# Altium schematic symbol library IndoorGuide_Tag_Device_V1.0.0.SCHLIB: 49 symbols
Pins are listed as number, name and electrical type; pins without a type are passive.

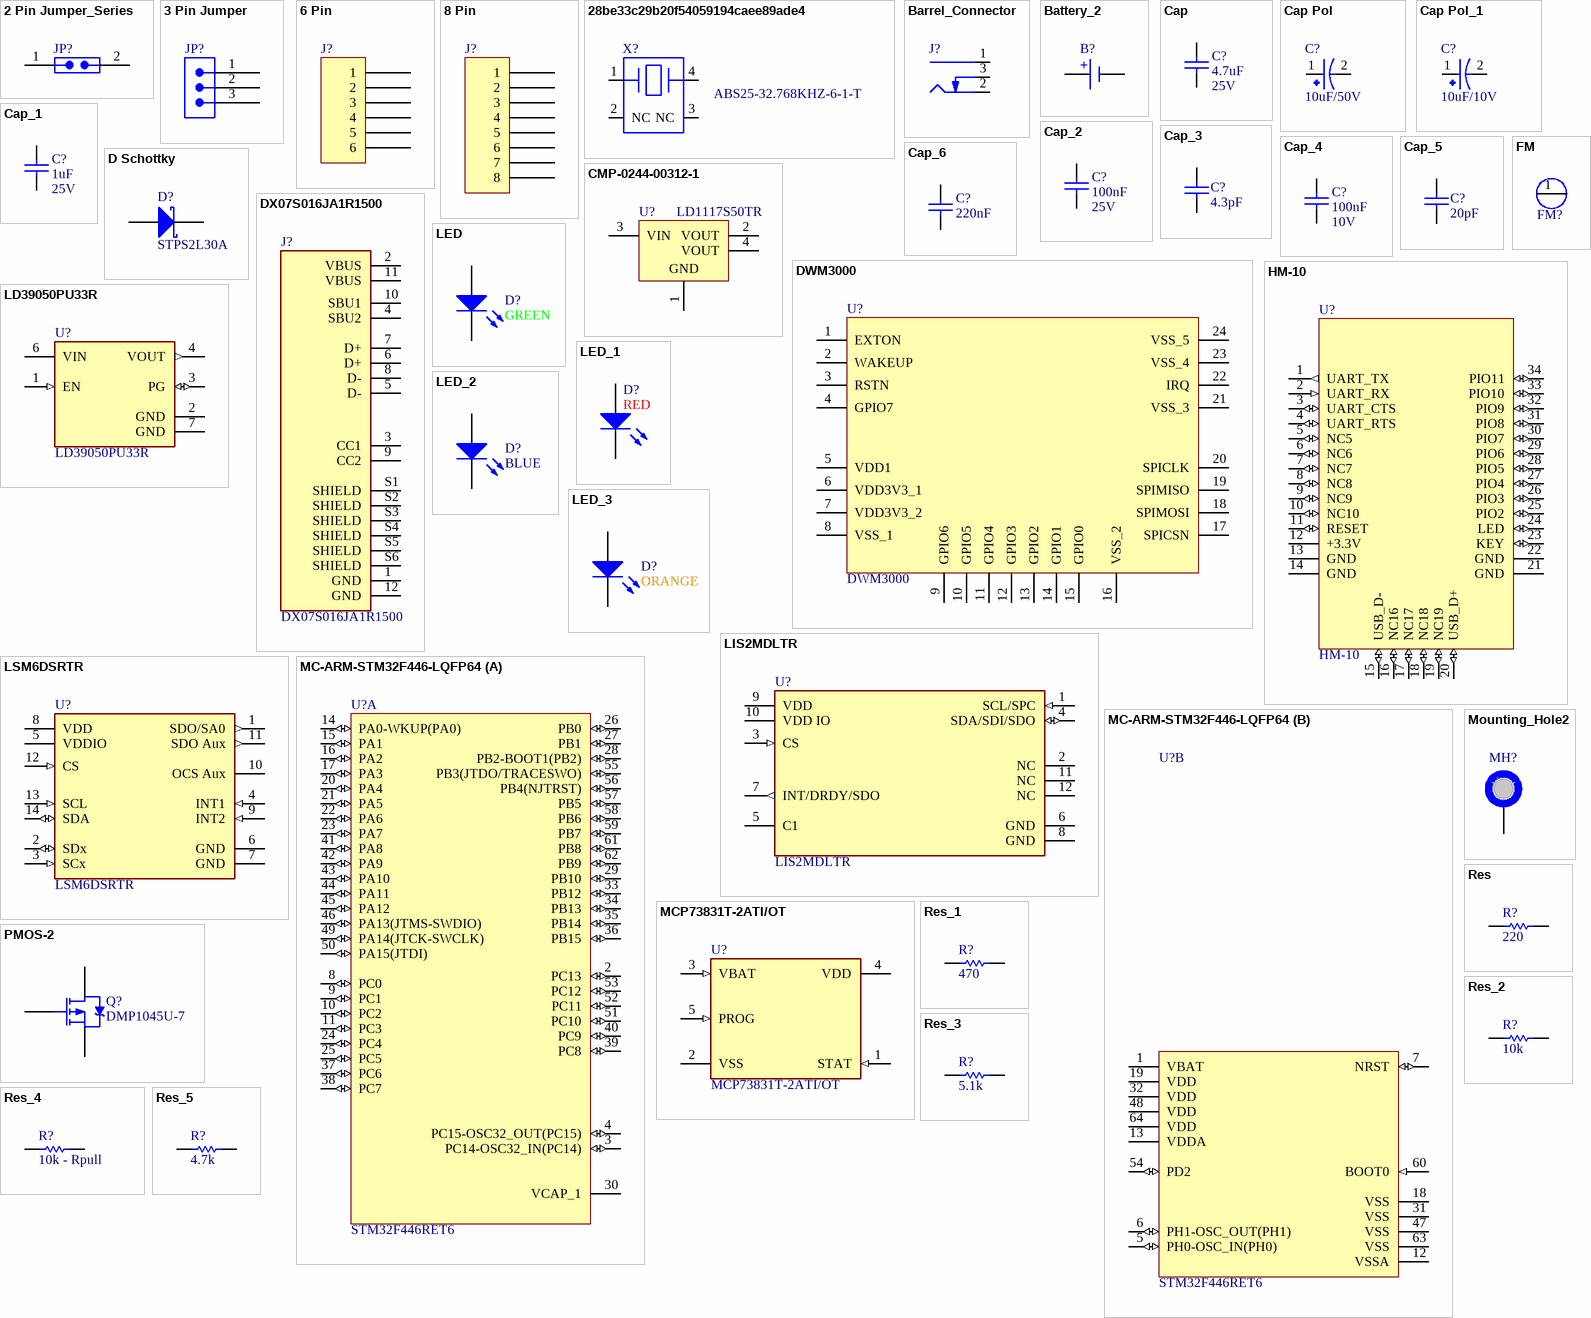
[diagram p0: symbols 2 Pin Jumper_Series to Res_5]

## 2 Pin Jumper_Series
designator JP?  (value not drawn)
2 Pin Jumper - place in series with wires.; Part Number: NC6-P108-03; Manufacturer: TE Connectivity AMP Connectors; Voltage Rating: 300V; Barrier Type: 2 Wall (Dual); Bottom Termination: PC Pin; Current Rating (Amps): 20A; Number of Circuits: 3; Pitch: 0.375" (9.53mm); Top Termination: Screws with Captive Plate; Wire Gauge: 12-22 AWG; Color: Black; ComponentLink1Description: Datasheet; ComponentLink1URL: https://www.te.com/commerce/DocumentDelivery/DDEController?Action=srchrtrv&DocNm=3-1437664-0&DocType=Customer+Drawing&DocLang=English; ComponentLink2Description: DigiKey Link; ComponentLink2URL: http://digikey.com/product-detail/en/te-connectivity-amp-connectors/NC6-P108-03/A98496-ND/1277927; LastUpdated: 1/15/2020 4:12:05 AM; Lifecycle Status: Active; Minimum Order: 1; Number of Rows: 1; Number of Wire Entries: 3; Packaging: Bulk; Part Status: Active; Price: 2.16; Series: NC6, Buchanan; Supplier 1: DigiKey; Supplier Part Number 1: A98496-ND; Terminal Block Type: Barrier Block
footprint SAMTEC_HTSW-101-07-S-D
pins: 1, 2

## 3 Pin Jumper
designator JP?
3 Pin Jumper; Voltage Rating: 300V
footprint SAMTEC_TS-103-T-A-1
pins: 1, 2, 3

## 6 Pin
designator J?
CONN RCPT 6POS 0.1 GOLD PCB
footprint HEADER_FEMALE_6POS_P2.54MM (2.54mm DIL PC TAIL PIN HEADER ASSEMBLY)
footprint JST XH B6B-XH-A
footprint TERMINAL_BLOCK_6POS_P2.54MM
footprint TERMINAL_BLOCK_6POS_P5.08MM (Wire to Board Terminal Block Horizontal with Board, 6 Postions, Body 31.08x8.2mm, Pitch 5.08mm)
pins: 1, 2, 3, 4, 5, 6

## 8 Pin
designator J?
CONN RCPT 8POS 0.1 GOLD PCB
footprint HEADER_FEMALE_8POS_P2.54MM (2.54mm DIL PC TAIL PIN HEADER ASSEMBLY)
footprint JST XH B8B-XH-A
footprint TERMINAL_BLOCK_8POS_P2.54MM
footprint TERMINAL_BLOCK_8POS_P5.08MM (Wire to Board Terminal Block Horizontal with Board, 8 Postions, Body 41.24x8.2mm, Pitch 5.08mm)
pins: 1, 2, 3, 4, 5, 6, 7, 8

## 28be33c29b20f54059194caee89ade4
designator X?, comment ABS25-32.768KHZ-6-1-T
SMD,3.8x8.4mm Crystals ROHS; Manufacturer: Abracon; MF: Abracon LLC; JLCPCB: C5369037; MP: ABS25-32.768KHZ-6-1-T; Manufacturer Part Number: ABS25-32.768KHZ-6-1-T
footprint FP-ABS25-MFG
pins: 1, 2 NC, 3 NC, 4

## Barrel_Connector
designator J?
CONN PWR JACK 2X5.5MM SOLDER
footprint PJ-102AH (DC Barrel Jack W/ Switch 2.0x5.5)
pins: 1 Centre, 2 Outer, 3 SW

## Battery_2
designator B?
BATTERY HOLDER 18650 PC PIN
footprint JST XH B2B-XH-A
pins: 1 +, 2 -

## Cap
designator C?, comment 4.7uF  Voltage Rating: 25V
25V 4.7uF X5R ±10% 0805 Multilayer Ceramic Capacitors MLCC - SMD/SMT ROHS; MF: Samsung Electro-Mechanics; MP: CL21A475KAQNNNE; JLCPCB: C1779
footprint cap0603
footprint cap0805
footprint CAP1206
footprint CAP0402
pins: 1, 2

## Cap Pol
designator C?, comment 10uF/50V
10uF 50V 800mΩ@100kHz ±10% CASE-D-7343 Tantalum Capacitors ROHS; MF: TAJD106K050RNJ; JLCPCB: C89596
footprint CAP1411
footprint FP-TAJD-MFG
pins: 1, 2
1 alternate drawing of the same symbol

## Cap Pol_1
designator C?, comment 10uF/10V
10V 10uF X7R ±10% 0805 Multilayer Ceramic Capacitors MLCC - SMD/SMT ROHS; MF: Murata Electronics; MP: GRM21BR71A106KE51L; JLCPCB: C86038
footprint CAP1411
pins: 1, 2
1 alternate drawing of the same symbol

## Cap_1
designator C?, comment 1uF  Voltage Rating: 25V
25V 1uF X7R ±10% 0805 Multilayer Ceramic Capacitors MLCC - SMD/SMT ROHS; MF: Murata Electronics; MP: GRM21BR71E105KA99L; JLCPCB: C77080
footprint cap0603
footprint cap0805
footprint CAP1206
footprint CAP0402
pins: 1, 2

## Cap_2
designator C?, comment 100nF  Voltage Rating: 25V
25V 100nF X7R ±10% 0805 Multilayer Ceramic Capacitors MLCC - SMD/SMT ROHS; MF: YAGEO; MP: CC0805KRX7R8BB104; JLCPCB: C519981
footprint cap0603
footprint cap0805
footprint CAP1206
footprint CAP0402
pins: 1, 2

## Cap_3
designator C?, comment 4.3pF
50V 4.3pF NP0 0805 Multilayer Ceramic Capacitors MLCC - SMD/SMT ROHS; MF: YAGEO; MP: CC0805CRNPO9BN4R3; JLCPCB: C2201928
footprint cap0603
footprint cap0805
footprint CAP1206
footprint CAP0402
pins: 1, 2

## Cap_4
designator C?, comment 100nF  Voltage Rating: 10V
10V 100nF U2J ±5% 0805 Multilayer Ceramic Capacitors MLCC - SMD/SMT ROHS; MF: Murata Electronics; MP: GRM21B7U1A104JA01L; JLCPCB: C710980
footprint cap0603
footprint cap0805
footprint CAP1206
footprint CAP0402
pins: 1, 2

## Cap_5
designator C?, comment 20pF
50V 20pF C0G ±5% 0805 Multilayer Ceramic Capacitors MLCC - SMD/SMT ROHS; MF: Samsung Electro-Mechanics; MP: CL21C200JBANNNC; JLCPCB: C1798
footprint cap0603
footprint cap0805
footprint CAP1206
footprint CAP0402
pins: 1, 2

## Cap_6
designator C?, comment 220nF
25V 220nF X7R ±10% 0805 Multilayer Ceramic Capacitors MLCC - SMD/SMT ROHS; Voltage Rating: 16V; MF: YAGEO; MP: CC0805KRX7R8BB224; JLCPCB: C107139
footprint cap0603
footprint cap0805
footprint CAP1206
footprint CAP0402
pins: 1, 2

## CMP-0244-00312-1
designator U?, comment LD1117S50TR
75dB@(120Hz) 800mA Fixed 5V Positive electrode 15V SOT-223-3 Voltage Regulators - Linear, Low Drop Out (LDO) Regulators ROHS; MF: STMicroelectronics; JLCPCB: C134077; MP: LD1117S50TR; Manufacturer: STMicroelectronics; Manufacturer Part Number: LD1117S50TR
footprint SOT-223_L (SOT223, 4-Leads, Body 6.5x3.5mm, Pitch 2.3mm, Lead Span 7mm, IPC High Density)
footprint SOT-223_N (SOT223, 4-Leads, Body 6.5x3.5mm, Pitch 2.3mm, Lead Span 7mm, IPC Medium Density)
footprint SOT-223_M (SOT223, 4-Leads, Body 6.5x3.5mm, Pitch 2.3mm, Lead Span 7mm, IPC Low Density)
pins: 1 GND (power), 2 VOUT (power), 3 VIN (power), 4 VOUT (power)

## D Schottky
designator D?, comment STPS2L30A
30V 450mV@2A 2A SMA(DO-214AC) Schottky Diodes ROHS; MF: STMicroelectronics; JLCPCB: C133102; MP: STPS2L30A
footprint DIOM5126X265N
pins: 1 A, 2 K

## DWM3000
designator U?
6.5 & 8.0 GHz Ultra-Wideband (UWB) Module,Supply voltage: 2.5 to 3.6 V (VDD3V3), 1.62 to 3.6 V (VDD1).; MP: DWM3000; MOUSER: N/A
footprint DWM3000
pins: 1 EXTON, 2 WAKEUP, 3 RSTN, 4 GPIO7, 5 VDD1, 6 VDD3V3_1, 7 VDD3V3_2, 8 VSS_1, 9 GPIO6, 10 GPIO5, 11 GPIO4, 12 GPIO3, 13 GPIO2, 14 GPIO1, 15 GPIO0, 16 VSS_2, 17 SPICSN, 18 SPIMOSI, 19 SPIMISO, 20 SPICLK, 21 VSS_3, 22 IRQ, 23 VSS_4, 24 VSS_5

## DX07S016JA1R1500
designator J?
USB-C (USB TYPE-C) USB 2.0 Receptacle Connector 24 (16+8 Dummy) Position Surface Mount, Right Angle; Through Hole; MP: DX07S016JA1R1500
footprint JAE_DX07S016JA1R1500
pins: 1 GND (power), 2 VBUS (power), 3 CC1, 4 SBU2, 5 D-, 6 D+, 7 D+, 8 D-, 9 CC2, 10 SBU1, 11 VBUS (power), 12 GND (power), S1 SHIELD, S2 SHIELD, S3 SHIELD, S4 SHIELD, S5 SHIELD, S6 SHIELD

## FM
designator FM?  (value not drawn)
Fiducial mark
footprint FM
pins: 1 FM

## HM-10
designator U?
Bluetooth 4.0 module with 4pin base board that can support iphone4s or later.
footprint 26.9X13X2.2_BOARD
pins: 1 UART_TX (out), 2 UART_RX (in), 3 UART_CTS (io), 4 UART_RTS (io), 5 NC5 (io), 6 NC6 (io), 7 NC7 (io), 8 NC8 (io), 9 NC9 (io), 10 NC10 (io), 11 RESET (io), 12 +3.3V (power), 13 GND (power), 14 GND (power), 15 USB_D- (io), 16 NC16 (io), 17 NC17 (io), 18 NC18 (io), 19 NC19 (io), 20 USB_D+ (io), 21 GND (power), 22 GND (power), 23 KEY (io), 24 LED (io), 25 PIO2 (io), 26 PIO3 (io), 27 PIO4 (io), 28 PIO5 (io), 29 PIO6 (io), 30 PIO7 (io), 31 PIO8 (io), 32 PIO9 (io), 33 PIO10 (io), 34 PIO11 (io)

## LD39050PU33R
designator U?
500mA 65dB Fixed 3.3V Positive electrode 5.5V DFN-6(3x3) Voltage Regulators - Linear, Low Drop Out (LDO) Regulators ROHS; MF: STMicroelectronics; JLCPCB: C132827; MP: LD39050PU33R
footprint SON95P300X300X100-7N
pins: 1 EN (in), 2 GND (power), 3 PG (io), 4 VOUT (out), 6 VIN (power), 7 GND (power)

## LED
designator D?, comment GREEN
Yellow Green 0805 LED Indication - Discrete ROHS; MF: BrtLed(Bright LED Elec); MP: BL-HGE35A-AV-TRB; JLCPCB: C165984
footprint LED0402
footprint LED0603
footprint LED_D3MM_P2.54MM
footprint LED0805
pins: 1 A, 2 K

## LED_1
designator D?, comment RED
Light Emitting Diode; MF: BrtLed(Bright LED Elec); MP: BL-HUF35A-AV-TRB; JLCPCB: C94741
footprint LED0402
footprint LED0603
footprint LED_D3MM_P2.54MM
footprint LED0805
pins: 1 A, 2 K

## LED_2
designator D?, comment BLUE
Light Emitting Diode; MF: *
footprint LED0402
footprint LED0603
footprint LED_D3MM_P2.54MM
footprint LED0805
pins: 1 A, 2 K

## LED_3
designator D?, comment ORANGE
Light Emitting Diode; MF: *
footprint LED0402
footprint LED0603
footprint LED_D3MM_P2.54MM
footprint LED0805
pins: 1 A, 2 K

## LIS2MDLTR
designator U?
SENSOR MR I2C/SPI 12LGA; MF: LIS2MDLTR
footprint FP-LGA-12-DM00170568-MFG
pins: 1 SCL/SPC (in), 2 NC, 3 CS (in), 4 SDA/SDI/SDO (io), 5 C1, 6 GND (power), 7 INT/DRDY/SDO (out), 8 GND (power), 9 VDD (power), 10 VDD IO (power), 11 NC, 12 NC

## LSM6DSRTR
designator U?
INEMO INERTIAL MODULE: 3D ACCELE; Manufacturer: STMicroelectronics; MF: LSM6DSRTR; Manufacturer Part Number: LSM6DSRTR
footprint FP-LGA-14L-DM00249496-MFG
pins: 1 SDO/SA0 (out), 2 SDx (io), 3 SCx (in), 4 INT1 (in), 5 VDDIO (power), 6 GND (power), 7 GND (power), 8 VDD (power), 9 INT2 (in), 10 OCS Aux, 11 SDO Aux (out), 12 CS (in), 13 SCL (in), 14 SDA (io)

## MC-ARM-STM32F446-LQFP64
designator U?, comment STM32F446RET6
ARM Cortex-M4 32-bit MCU+FPU, 512 KB Flash, 128 KB Internal RAM, 50 I/Os, 64-Pin LQFP, -40 to 85 degC, Tray; Manufacturer: STMicroelectronics; Manufacturer Part Number: STM32F446RET6U; I/Os (High Current): 50; Supply Voltage(Vcc) min (V): 1.7; Operating Frequency(F) (Processor speed) (MHz): 180; D/A Converter: 2; Internal RAM Size (kB): 128; FLASH Size (Prog) (kB): 512; Core: ARM Cortex-M4; ComponentLink1Description: Manufacturer URL; Package Reference: 64-Pin Low-profile Quad Flat Package, Body 10 x 10 mm, Pitch 0.5 mm; ComponentLink2URL: http://www.st.com/st-web-ui/static/active/en/resource/technical/document/datasheet/DM00141306.pdf; Packing: Tray; DatasheetVersion: Rev. 6; ComponentLink1URL: http://www.st.com/; ComponentLink2Description: Datasheet; Package Description: LQFP64; Mounting Technology: Surface Mount; Manufacturer Part Number: STM32F446RET6
footprint QFP50P1200X1200X160-64N
part A pins: 2 PC13 (io) "PC13/EVENTOUT/TAMP_1/WKUP1", 3 PC14-OSC32_IN(PC14) (io) "PC14/EVENTOUT/OSC32_IN", 4 PC15-OSC32_OUT(PC15) (io) "PC15/EVENTOUT/OSC32_OUT", 8 PC0 (io) "PC0/SAI1_MCLK_B,OTG_HS_ULPI_STP,FMC_SDNWE,EVENTOUT/ADC123_IN10", 9 PC1 (io) "PC1/SPI3_MOSI/I2S3_SD,SAI1_SD_A,SPI2_MOSI/I2S2_SD,EVENTOUT/ADC123_IN11", 10 PC2 (io) "PC2/SPI2_MISO,OTG_HS_ULPI_DIR,FMC_SDNE0,EVENTOUT/ADC123_IN12", 11 PC3 (io) "PC3/SPI2_MOSI/I2S2_SD,OTG_HS_ULPI_NXT,FMC_SDCKE0,EVENTOUT/ADC123_IN13", 14 PA0-WKUP(PA0) (io) "PA0-WKUP(PA0)/TIM2_CH1/TIM2_ETR,TIM5_CH1,TIM8_ETR,USART2_CTS,UART4_TX,EVENTOUT/ADC123_IN0,WKUP0/TAMP_2", 15 PA1 (io) "PA1/TIM2_CH2,TIM5_CH2,USART2_RTS,UART4_RX,QUADSPI_BK1_IO3,SAI2_MCLK_B,EVENTOUT/ADC123_IN1", 16 PA2 (io) "PA2/TIM2_CH3,TIM5_CH3,TIM9_CH1,USART2_TX,SAI2_SCK_B,EVENTOUT/ADC123_IN2", 17 PA3 (io) "PA3/TIM2_CH4,TIM5_CH4,TIM9_CH2,SAI1_FS_A,USART2_RX,OTG_HS_ULPI_D0,EVENTOUT/ADC123_IN3", 20 PA4 (io) "PA4/SPI1_NSS/I2S1_WS,SPI3_NSS/I2S3_WS,USART2_CK,OTG_HS_SOF,DCMI_HSYNC,EVENTOUT/ADC12_IN4,DAC_OUT1", 21 PA5 (io) "PA5/TIM2_CH1/TIM2_ETR,TIM8_CH1N,SPI1_SCK/I2S1_CK,OTG_HS_ULPI_CK,EVENTOUT/ADC12_IN5,DAC_OUT2", 22 PA6 (io) "PA6/TIM1_BKIN,TIM3_CH1,TIM8_BKIN,SPI1_MISO,I2S2_MCK,TIM13_CH1,DCMI_PIXCLK,EVENTOUT/ADC12_IN6", 23 PA7 (io) "PA7/TIM1_CH1N,TIM3_CH2,TIM8_CH1N,SPI1_MOSI/I2S1_SD,TIM14_CH1,FMC_SDNWE,EVENTOUT/ADC12_IN7", 24 PC4 (io) "PC4/I2S1_MCK,SPDIFRX_IN2,FMC_SDNE0,EVENTOUT/ADC12_IN14", 25 PC5 (io) "PC5/USART3_RX,SPDIFRX_IN3,FMC_SDCKE0,EVENTOUT/ADC12_IN15", 26 PB0 (io) "PB0/TIM1_CH2N,TIM3_CH3,TIM8_CH2N,SPI3_MOSI/I2S3_SD,UART4_CTS,OTG_HS_ULPI_D1,SDIO_D1,EVENTOUT/ADC12_IN8", 27 PB1 (io) "PB1/TIM1_CH3N,TIM3_CH4,TIM8_CH3N,OTG_HS_ULPI_D2,SDIO_D2,EVENTOUT/ADC12_IN9", 28 PB2-BOOT1(PB2) (io) "PB2-BOOT1(PB2)/TIM2_CH4,SAI1_SD_A,SPI3_MOSI/I2S3_SD,QUADSPI_CLK,OTG_HS_ULPI_D4,SDIO_CK,EVENTOUT", 29 PB10 (io) "PB10/TIM2_CH3,I2C2_SCL,SPI2_SCK/I2S2_CK,SAI1_SCK_A,USART3_TX,OTG_HS_ULPI_D3,EVENTOUT", 30 VCAP_1, 33 PB12 (io) "PB12/TIM1_BKIN,I2C2_SMBA,SPI2_NSS/I2S2_WS,SAI1_SCK_B,USART3_CK,CAN2_RX,OTG_HS_ULPI_D5,OTG_HS_ID,EVENTOUT", 34 PB13 (io) "PB13/TIM1_CH1N,SPI2_SCK/I2S2_CK,USART3_CTS,CAN2_TX,OTG_HS_ULPI_D6,EVENTOUT/OTG_HS_VBUS", 35 PB14 (io) "PB14/TIM1_CH2N,TIM8_CH2N,SPI2_MISO,USART3_RTS,TIM12_CH1,OTG_HS_DM,EVENTOUT", 36 PB15 (io) "PB15/RTC_REFIN,TIM1_CH3N,TIM8_CH3N,SPI2_MOSI/I2S2_SD,TIM12_CH2,OTG_HS_DP,EVENTOUT", 37 PC6 (io) "PC6/TIM3_CH1,TIM8_CH1,FMPI2C1_SCL,I2S2_MCK,USART6_TX,SDIO_D6,DCMI_D0,EVENTOUT", 38 PC7 (io) "PC7/TIM3_CH2,TIM8_CH2,FMPI2C1_SDA,SPI2_SCK/I2S2_CK,I2S3_MCK,SPDIFRX_IN1,USART6_RX,SDIO_D7,DCMI_D1,EVENTOUT", 39 PC8 (io) "PC8/TRACED0,TIM3_CH3,TIM8_CH3,UART5_RTS,USART6_CK,SDIO_D0,DCMI_D2,EVENTOUT", 40 PC9 (io) "PC9/MCO2,TIM3_CH4,TIM8_CH4,I2C3_SDA,I2S_CKIN,UART5_CTS,QUADSPI_BK1_IO0,SDIO_D1,DCMI_D3,EVENTOUT", 41 PA8 (io) "PA8/MCO1,TIM1_CH1,I2C3_SCL,USART1_CK,OTG_FS_SOF,EVENTOUT", 42 PA9 (io) "PA9/TIM1_CH2,I2C3_SMBA,SPI2_SCK/I2S2_CK,SAI1_SD_B,USART1_TX,DCMI_D0,EVENTOUT/OTG_FS_VBUS", 43 PA10 (io) "PA10/TIM1_CH3,USART1_RX,OTG_FS_ID,DCMI_D1,EVENTOUT", 44 PA11 (io) "PA11/TIM1_CH4,USART1_CTS,CAN1_RX,OTG_FS_DM,EVENTOUT", 45 PA12 (io) "PA12/TIM1_ETR,USART1_RTS,SAI2_FS_B,CAN1_TX,OTG_FS_DP,EVENTOUT", 46 PA13(JTMS-SWDIO) (io) "PA13/JTMS-SWDIO,EVENTOUT", 49 PA14(JTCK-SWCLK) (io) "PA14/JTCK-SWCLK,EVENTOUT", 50 PA15(JTDI) (io) "PA15/JTDI,TIM2_CH1/TIM2_ETR,HDMI_CEC,SPI1_NSS/I2S1_WS,SPI3_NSS/I2S3_WS,UART4_RTS,EVENTOUT", 51 PC10 (io) "PC10/SPI3_SCK/I2S3_CK,USART3_TX,UART4_TX,QUADSPI_BK1_IO1,SDIO_D2,DCMI_D8,EVENTOUT", 52 PC11 (io) "PC11/SPI3_MISO,USART3_RX,UART4_RX,QUADSPI_BK2_NCS,SDIO_D3,DCMI_D4,EVENTOUT", 53 PC12 (io) "PC12/I2C2_SDA,SPI3_MOSI/I2S3_SD,USART3_CK,UART5_TX,SDIO_CK,DCMI_D9,EVENTOUT", 55 PB3(JTDO/TRACESWO) (io) "PB3/JTDO/TRACESWO,TIM2_CH2,I2C2_SDA,SPI1_SCK/I2S1_CK,SPI3_SCK/I2S3_CK,EVENTOUT", 56 PB4(NJTRST) (io) "PB4/NJTRST,TIM3_CH1,I2C3_SDA,SPI1_MISO,SPI3_MISO,SPI2_NSS/I2S2_WS,EVENTOUT", 57 PB5 (io) "PB5/TIM3_CH2,I2C1_SMBA,SPI1_MOSI/I2S1_SD,SPI3_MOSI/I2S3_SD,CAN2_RX,OTG_HS_ULPI_D7,FMC_SDCKE1,DCMI_D10,EVENTOUT", 58 PB6 (io) "PB6/TIM4_CH1,HDMI_CEC,I2C1_SCL,USART1_TX,CAN2_TX,QUADSPI_BK1_NCS,FMC_SDNE1,DCMI_D5,EVENTOUT", 59 PB7 (io) "PB7/TIM4_CH2,I2C1_SDA,USART1_RX,SPDIFRX_IN0,FMC_NL,DCMI_VSYNC,EVENTOUT", 61 PB8 (io) "PB8/TIM2_CH1/TIM2_ETR,TIM4_CH3,TIM10_CH1,I2C1_SCL,CAN1_RX,SDIO_D4,DCMI_D6,EVENTOUT", 62 PB9 (io) "PB9/TIM2_CH2,TIM4_CH4,TIM11_CH1,I2C1_SDA,SPI2_NSS/I2S2_WS,SAI1_FS_B,CAN1_TX,SDIO_D5,DCMI_D7,EVENTOUT"
part B pins: 1 VBAT (power), 5 PH0-OSC_IN(PH0) (io) "PH0/EVENTOUT/OSC_IN", 6 PH1-OSC_OUT(PH1) (io) "PH1/EVENTOUT/OSC_OUT", 7 NRST (io), 12 VSSA (power), 13 VDDA (power), 18 VSS (power), 19 VDD (power), 31 VSS (power), 32 VDD (power), 47 VSS (power), 48 VDD (power), 54 PD2 (io) "PD2/TIM3_ETR,UART5_RX,SDIO_CMD,DCMI_D11,EVENTOUT", 60 BOOT0 (in) "BOOT0/VPP", 63 VSS (power), 64 VDD (power)

## MCP73831T-2ATI/OT
designator U?
6V Lithium-ion/Polymer 1 500mA SOT-23-5 Battery Management ROHS; MF: Microchip Tech; JLCPCB: C14879; MP: MCP73831T-2ATI/OT
footprint SOT95P280X145-5N
pins: 1 STAT (in), 2 VSS (power), 3 VBAT (in), 4 VDD (power), 5 PROG (in)

## Mounting_Hole2
designator MH?, comment MH_7.4MMC_3.2MMD  (value not drawn)  (no BOM)
Mounting Hole 7.4mm Diameter, 3.2mm Drill
footprint MECHANICAL_M3
footprint MECHANICAL_M3_NON_PLATED
pins: 1

## PMOS-2
designator Q?, comment DMP1045U-7
12V 4A 31mΩ@4.5V,4A 800mW 1V@250uA 1 Piece P-Channel SOT-23 MOSFETs ROHS; MF: Diodes Incorporated; JLCPCB: C177033; MP: DMP1045U-7
footprint TO-220AB (TO, Thru-Hole, Vertical, Heatsink Mounted; 3 In-Line Leads; Pitch 2.54 mm)
simulation model IRF9510 (Spice Subcircuit)
footprint SOT23
pins: 1 G, 2 D, 3 S

## Res
designator R?, comment 220
125mW Thick Film Resistors 150V ±100ppm/℃ ±1% 220Ω 0805 Chip Resistor - Surface Mount ROHS; MF: UNI-ROYAL(Uniroyal Elec); MP: 0805W8F2200T5E; JLCPCB: C17557
footprint RES0402
footprint res1206
footprint res0603
footprint AXIAL-0.4 (Axial Device, Thru-Hole; 2 Leads; 0.4 in Pin Spacing)
footprint RES0805
pins: 1, 2

## Res_1
designator R?, comment 470
125mW Thick Film Resistors 150V ±100ppm/℃ ±1% 470Ω 0805 Chip Resistor - Surface Mount ROHS; MF: UNI-ROYAL(Uniroyal Elec); MP: 0805W8F4700T5E; JLCPCB: C17710
footprint RES0402
footprint res1206
footprint res0603
footprint AXIAL-0.4 (Axial Device, Thru-Hole; 2 Leads; 0.4 in Pin Spacing)
footprint RES0805
pins: 1, 2

## Res_2
designator R?, comment 10k
125mW Thick Film Resistors 150V ±100ppm/℃ ±1% 10kΩ 0805 Chip Resistor - Surface Mount ROHS; MF: UNI-ROYAL(Uniroyal Elec); MP: 0805W8F1002T5E; JLCPCB: C17414
footprint RES0402
footprint res1206
footprint res0603
footprint AXIAL-0.4 (Axial Device, Thru-Hole; 2 Leads; 0.4 in Pin Spacing)
footprint RES0805
pins: 1, 2

## Res_3
designator R?, comment 5.1k
125mW Thick Film Resistors 150V ±100ppm/℃ ±5% 5.1kΩ 0805 Chip Resistor - Surface Mount ROHS; MF: UNI-ROYAL(Uniroyal Elec); MP: 0805W8J0512T5E; JLCPCB: C26023
footprint RES0402
footprint res1206
footprint res0603
footprint AXIAL-0.4 (Axial Device, Thru-Hole; 2 Leads; 0.4 in Pin Spacing)
footprint RES0805
pins: 1, 2

## Res_4
designator R?, comment 10k - Rpull
125mW Thick Film Resistors 150V ±100ppm/℃ ±1% 10kΩ 0805 Chip Resistor - Surface Mount ROHS; MF: UNI-ROYAL(Uniroyal Elec); MP: 0805W8F1002T5E; JLCPCB: C17414
footprint RES0402
footprint res1206
footprint res0603
footprint AXIAL-0.4 (Axial Device, Thru-Hole; 2 Leads; 0.4 in Pin Spacing)
footprint RES0805
pins: 1, 2

## Res_5
designator R?, comment 4.7k
125mW Thick Film Resistors 150V ±100ppm/℃ ±1% 4.7kΩ 0805 Chip Resistor - Surface Mount ROHS; MF: UNI-ROYAL(Uniroyal Elec); MP: 0805W8F4701T5E; JLCPCB: C17673
footprint RES0402
footprint res1206
footprint res0603
footprint AXIAL-0.4 (Axial Device, Thru-Hole; 2 Leads; 0.4 in Pin Spacing)
footprint RES0805
pins: 1, 2

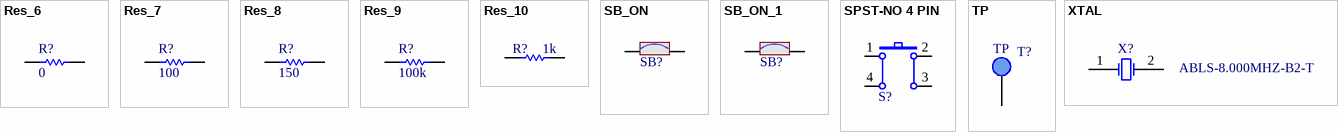
[diagram p1: symbols Res_6 to XTAL]

## Res_6
designator R?, comment 0
125mW Thick Film Resistors 150V ±800ppm/℃ ±1% 0Ω 0805 Chip Resistor - Surface Mount ROHS; MF: UNI-ROYAL(Uniroyal Elec); MP: 0805W8F0000T5E; JLCPCB: C17477
footprint RES0402
footprint res1206
footprint res0603
footprint AXIAL-0.4 (Axial Device, Thru-Hole; 2 Leads; 0.4 in Pin Spacing)
footprint RES0805
pins: 1, 2

## Res_7
designator R?, comment 100
125mW Thick Film Resistors 150V ±100ppm/℃ ±1% 100Ω 0805 Chip Resistor - Surface Mount ROHS; MF: UNI-ROYAL(Uniroyal Elec); MP: 0805W8F1000T5E; JLCPCB: C17408
footprint RES0402
footprint res1206
footprint res0603
footprint AXIAL-0.4 (Axial Device, Thru-Hole; 2 Leads; 0.4 in Pin Spacing)
footprint RES0805
pins: 1, 2

## Res_8
designator R?, comment 150
125mW Thick Film Resistors 150V ±100ppm/℃ ±1% 150Ω 0805 Chip Resistor - Surface Mount ROHS; MF: UNI-ROYAL(Uniroyal Elec); MP: 0805W8F1500T5E; JLCPCB: C17471
footprint RES0402
footprint res1206
footprint res0603
footprint AXIAL-0.4 (Axial Device, Thru-Hole; 2 Leads; 0.4 in Pin Spacing)
footprint RES0805
pins: 1, 2

## Res_9
designator R?, comment 100k
±1% 100kΩ 0805 Chip Resistor - Surface Mount ROHS; MF: UNI-ROYAL(Uniroyal Elec); MP: 0805W8F1003T5E; JLCPCB: C17407
footprint RES0402
footprint res1206
footprint res0603
footprint AXIAL-0.4 (Axial Device, Thru-Hole; 2 Leads; 0.4 in Pin Spacing)
footprint RES0805
pins: 1, 2

## Res_10
designator R?, comment 1k
Resistor; MF: UNI-ROYAL(Uniroyal Elec); MP: 0805W8F1001T5E; JLCPCB: C17513
footprint RES0402
footprint res1206
footprint res0603
footprint AXIAL-0.4 (Axial Device, Thru-Hole; 2 Leads; 0.4 in Pin Spacing)
footprint RES0805
pins: 1, 2

## SB_ON
designator SB?  (value not drawn)
500mW 0Ω Current Sensing Resistors ±150ppm/℃ 0805 Current Sense Resistors / Shunt Resistors ROHS; MF: ROHM Semicon; MP: PMR10EZPJ000; JLCPCB: C2842889
footprint SOLDER-BRIDGE_R0603-0R
footprint SOLDER-BRIDGE_R0402-0R
footprint SOLDER-BRIDGE_R0805-0R
footprint SOLDER-BRIDGE_R1210-0R
pins: 1, 2

## SB_ON_1
designator SB?, comment SB_ON  (value not drawn)
100mW Thick Film Resistors 75V ±5% ±800ppm/℃ 0Ω 0603 Chip Resistor - Surface Mount ROHS; MF: UNI-ROYAL(Uniroyal Elec); MP: 0603WAJ0000T5E; JLCPCB: C15402
footprint SOLDER-BRIDGE_R0603-0R
footprint SOLDER-BRIDGE_R0402-0R
footprint SOLDER-BRIDGE_R0805-0R
footprint SOLDER-BRIDGE_R1210-0R
pins: 1, 2

## SPST-NO 4 PIN
designator S?  (value not drawn)
Switch Push button
footprint SW_5-1437565-0
pins: 1, 2, 3, 4

## TP
designator T?
Test Point
footprint tp
footprint TP-Top
pins: 1    TP

## XTAL
designator X?, comment ABLS-8.000MHZ-B2-T
Crystals 8.0 MHZ 18PF 80 OHMAUTO; MF: ABRACON; MOUSER: 815-ABLS-8-B2; MP: ABLS-8.000MHZ-B2-T
simulation model XTAL (Spice Subcircuit)
footprint XTAL_ABLS-8.000MHZ-B2-T
pins: 1 OSC1, 2 OSC2